# Altium schematic symbol library ESD5311X.SchLib: 1 symbol
Pins are listed as number, name and electrical type; pins without a type are passive.

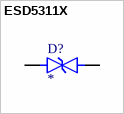
[diagram p0: symbol ESD5311X]

## ESD5311X
designator D?
Bidirectional TVS ESD Protection Diode, 5V Working Voltage, Low Capacitance, 80W Peak Pulse Power, DFN1006-2 Package.; MF: Nexperia; MP: PZU13B2L,315; SnapEDA_Link: https://www.snapeda.com/parts/PZU13B2L,315/Nexperia/view-part/?ref=snap; Package: DFN1006-2-2 Nexperia USA Inc.; Value: *; Check_prices: https://www.snapeda.com/parts/PZU13B2L,315/Nexperia/view-part/?ref=eda
footprint DIO_PZU13B2L,315
pins: 1 K, 2 A